# Altium footprint library Capacitor.PcbLib: 73 footprints (part 5 of 5)
Each footprint in its own frame and in the unit in brackets; x right, y up, seen from the top. Pads: shape width x height; smd on the part's side, far side on the other; paste and mask are expansions set on the pad; w line width, h text height; cw(c..) or ccw(c..) is an arc to the next point about the centre after c.
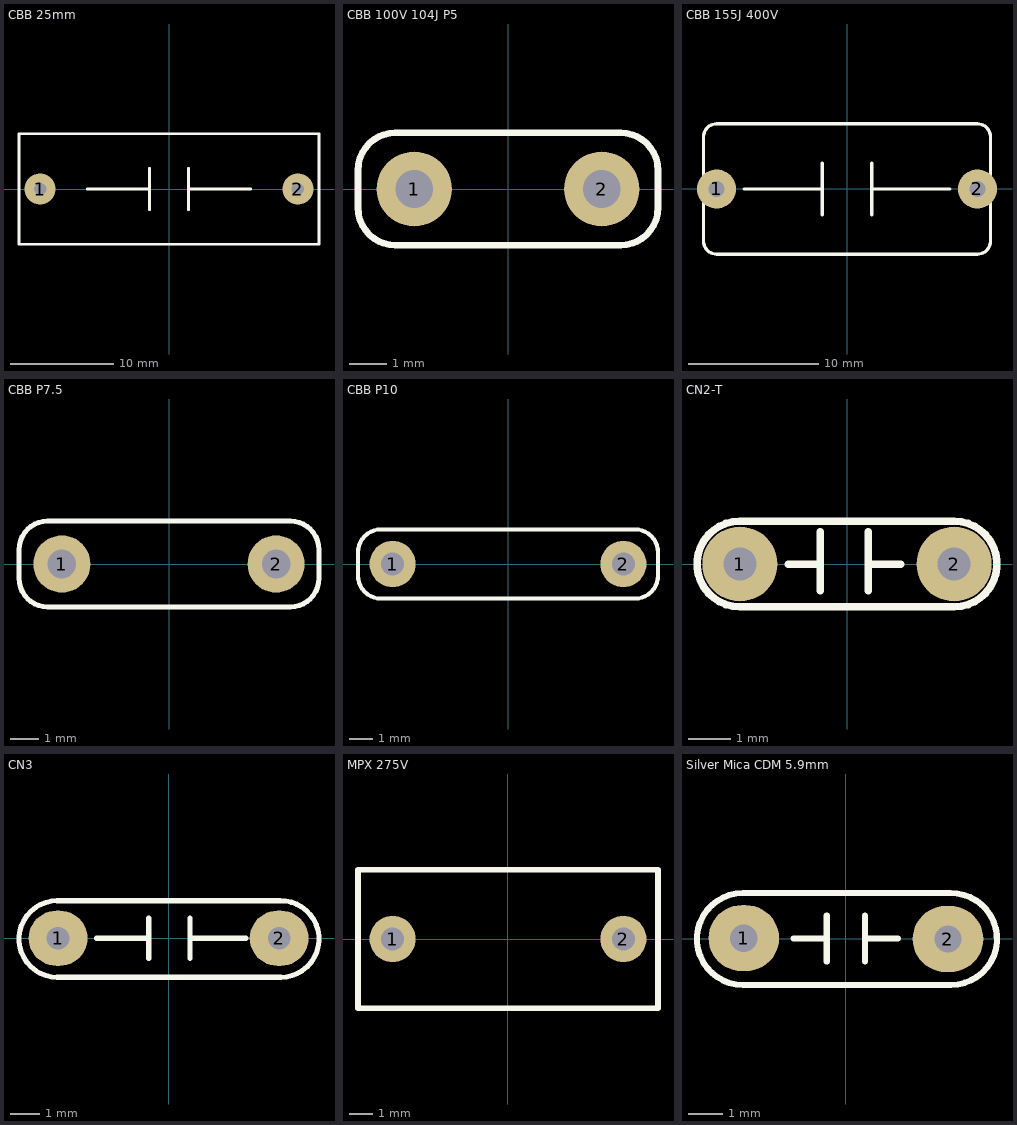
[diagram p4: the footprints below, top view; thin cyan lines are the x and y axes]

## CBB 25mm [mm]
pads (2):
  round 3 hole 1.2: 1(-12.446,0) 2(12.446,0)
Top Overlay:
  lines w0.254: -7.888,0 -1.888,0 ; -1.888,-2 -1.888,2 ; 1.888,-2 1.888,2 ; 1.888,0 7.888,0 ; -14.478,-5.334 14.478,-5.334 14.478,5.334 -13.716,5.334 -14.478,5.334 -14.478,-5.334
Top Designator:
  text ".Designator" at -3.71,-0.344 h1.52
3D body "Capacitor de Polyester CBB22 25mm.step": height 23, standoff 0, extent -13.612,-5.12 13.688,5.1

## CBB 100V 104J P5 [mm] "5mm"
pads (2):
  round 2 hole 1: 1(-2.5,0) 2(2.5,0)
Top Overlay:
  lines w0.178: -4,-0.5 ccw(c-3,-0.5) -3,-1.5 3,-1.5 ccw(c3,-0.5) 4,-0.5 4,0.5 ccw(c3,0.5) 3,1.5 -3,1.5 ccw(c-3,0.5) -4,0.5 -4,-0.5
Top Designator:
  text ".Designator" at -3.71,-0.344 h1.52
3D body: height 6, standoff 0, extent -4,-1.5 4,1.5

## CBB 155J 400V [mm]
pads (2):
  round 3 hole 1.2: 1(-10,0) 2(10,0)
Top Overlay:
  lines w0.254: -7.888,0 -1.888,0 ; -1.888,-2 -1.888,2 ; 1.888,-2 1.888,2 ; 1.888,0 7.888,0 ; -11,-4 ccw(c-10,-4) -10,-5 10,-5 ccw(c10,-4) 11,-4 11,4 ccw(c10,4) 10,5 -10,5 ccw(c-10,4) -11,4 -11,-4
Top Designator:
  text ".Designator" at -3.71,-0.344 h1.52
3D body "684_400V_20MM.STEP": height 13, standoff -3.5, extent -10.889,-4 11.111,4

## CBB P7.5 [mm] "7.5mm"
pads (2):
  round 2 hole 1: 1(-3.75,0) 2(3.75,0)
Top Overlay:
  lines w0.178: -5.25,-0.5 ccw(c-4.25,-0.5) -4.25,-1.5 4.25,-1.5 ccw(c4.25,-0.5) 5.25,-0.5 5.25,0.5 ccw(c4.25,0.5) 4.25,1.5 -4.25,1.5 ccw(c-4.25,0.5) -5.25,0.5 -5.25,-0.5
Top Designator:
  text ".Designator" at -3.71,-0.344 h1.52
3D body: height 6, standoff 0, extent -5.25,-1.5 5.25,1.5

## CBB P10 [mm] "10mm"
pads (2):
  round 2 hole 1: 1(-5,0) 2(5,0)
Top Overlay:
  lines w0.178: -6.5,-0.5 ccw(c-5.5,-0.5) -5.5,-1.5 5.5,-1.5 ccw(c5.5,-0.5) 6.5,-0.5 6.5,0.5 ccw(c5.5,0.5) 5.5,1.5 -5.5,1.5 ccw(c-5.5,0.5) -6.5,0.5 -6.5,-0.5
Top Designator:
  text ".Designator" at -3.71,-0.344 h1.52
3D body: height 6, standoff 0, extent -6.5,-1.5 6.5,1.5

## CN2-T [mil]
height 200
pads (2):
  round 70 hole 31: 1(-100,0) 2(100,0)
Top Overlay:
  lines w7: -55,0 -25,0 ; -25,-25 -25,30 ; 20,-25 20,30 ; 20,0 50,0 ; -100,-40 cw(c-100,0) -100,40 100,40 cw(c100,0) 100,-40 -100,-40
Top Designator:
  text ".Designator" at -146.08,-13.54 h60
3D body "User Library-Disc_CAP d6x3_5_5mm.step": height 318.9, standoff -79.53, extent -118.11,-42.67 118.11,40

## CN3 [mil]
pads (2):
  oval 80x75 hole 31: 1(-150,0) 2(150,0)
Top Overlay:
  lines w7: -151,-53 cw(c-151,-1) -151,51 ; -150,51 150,51 ; -149,-53 150,-53 ; -98,0 -27,0 ; -27,-27.5 -27,27.5 ; 29,-27.5 29,27.5 ; 29,0 105,0 ; 150.96,50.99 cw(c152,-1) 152,-53
Top Designator:
  text ".Designator" at -145.58,-14.54 h60
3D body "SW3dPS-Panasonic ECK-A3D102KBP.STEP": height 419.95, standoff -100, extent -157.5,-39.85 157.5,53.94

## MPX 275V [mm] "13x12x6mm"
pads (2):
  round 2 hole 1: 1(-5,0) 2(5,0)
Top Overlay:
  lines w0.254: -6.5,-3 -6.5,3 6.5,3 6.5,-3 -6.5,-3
Top Designator:
  text ".Designator" at -3.71,-0.344 h1.52
3D body "X2 Film Capacitor.STEP": height 11.2, standoff -4.8, extent -6.5,-2.5 6.5,2.5

## Silver Mica CDM 5.9mm [mil]
pads (2):
  oval 80x75 hole 31: 1(-115.64,0.5) 2(115.64,-0.5)
Top Overlay:
  lines w7: -116.64,-52.5 cw(c-116.64,-0.5) -116.64,51.5 ; -115.64,51.5 118.14,51.5 cw(c119.18,-0.49) 119.18,-52.49 ; -114.64,-52.5 118.14,-52.5 ; -59.06,0 -21.64,0 ; -21.64,-26.02 -21.64,26.02 ; 21.64,-26.02 21.64,26.02 ; 21.64,0 59.06,0
Top Designator:
  text ".Designator" at -138.72,-13.04 h60
3D body "SW3dPS-Panasonic ECK-A3D102KBP.STEP": height 419.95, standoff -100, extent -157.5,-57.02 157.5,37.2